# Altium schematic symbol library OPA4377.SCHLIB: 11 symbols
Pins are listed as number, name and electrical type; pins without a type are passive.

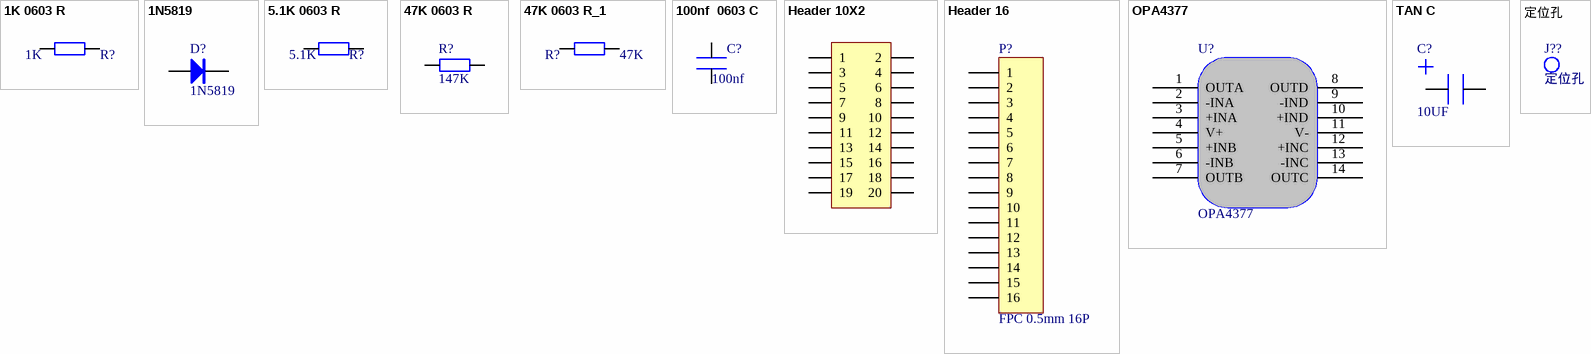
[diagram p0: symbols 1K 0603 R to 定位孔]

## 1K 0603 R
designator R?, comment 1K
footprint R0603
pins: 1, 2

## 1N5819
designator D?
肖特基二极管; 淘宝ID: 黄晶宝石; 属性: 40V/2A; BOM名称: 肖特基二极管; 欢迎光临: https://shop463601444.taobao.com
footprint SOD-523 (1.2x0.8X0.6mm（长宽高，不包括引脚）)
pins: 1 A, 2 K

## 5.1K 0603 R
designator R?, comment 5.1K
footprint R0603
pins: 1, 2

## 47K 0603 R
designator R?, comment 147K
footprint R0603
pins: 1, 2

## 47K 0603 R_1
designator R?, comment 47K
footprint R0603
pins: 1, 2

## 100nf  0603 C
designator C?, comment 100nf
footprint C0603
pins: 1, 2

## Header 10X2
designator JP??, comment Header 2X10  (value not drawn)
10*2P接插件; 版权归属: 源创客; BOM名称: 10*2P接插件; 学习资源: www.ooocke.com
footprint IDC2.54-LI-2x10P (20P简易牛角座)
footprint HDR2.54-LI-2x10P (双排排针，10x2脚)
footprint HDR2.54-M-LS-2x10P (脚距：2.54mm，贴片双排母)
footprint HDR2.54-WI-2x10P
pins: 1, 2, 3, 4, 5, 6, 7, 8, 9, 10, 11, 12, 13, 14, 15, 16, 17, 18, 19, 20

## Header 16
designator P?, comment FPC 0.5mm 16P
Header, 16-Pin; LatestRevisionDate: 17-Jul-2002; LatestRevisionNote: Re-released for DXP Platform.; Publisher: Altium Limited
footprint HDR1X16 (Connector; Header; 16 Position)
signal-integrity model Connector
footprint FPC0.5 2H-WS-8P (长：8.2mm，宽：5.2mm，高：2mm)
footprint FPC-SMD_16P-P0.50_HDGC_0.5K-AS-16PWB
footprint FPC0.5 2H-WS-16P (长：12.2mm，宽：5.2mm，高：2mm 淘宝ID:黄晶宝石   店铺网址:https://shop463601444.taobao.com)
pins: 1, 2, 3, 4, 5, 6, 7, 8, 9, 10, 11, 12, 13, 14, 15, 16

## OPA4377
designator U?
footprint TSSOP-14 (4.96x4.40x1.00 e=0.65（蒜米工坊）)
pins: 1 OUTA, 2 -INA, 3 +INA, 4 V+, 5 +INB, 6 -INB, 7 OUTB, 8 OUTD, 9 -IND, 10 +IND, 11 V-, 12 +INC, 13 -INC, 14 OUTC

## TAN C
designator C?, comment 10UF
footprint 0805 电容 C3
pins: 1, 2

## 定位孔
designator J??
footprint M3 星孔 定位孔
footprint MTGP720H320V6P - duplicate